# Altium schematic symbol library Module.SchLib: 74 symbols (part 2 of 2)
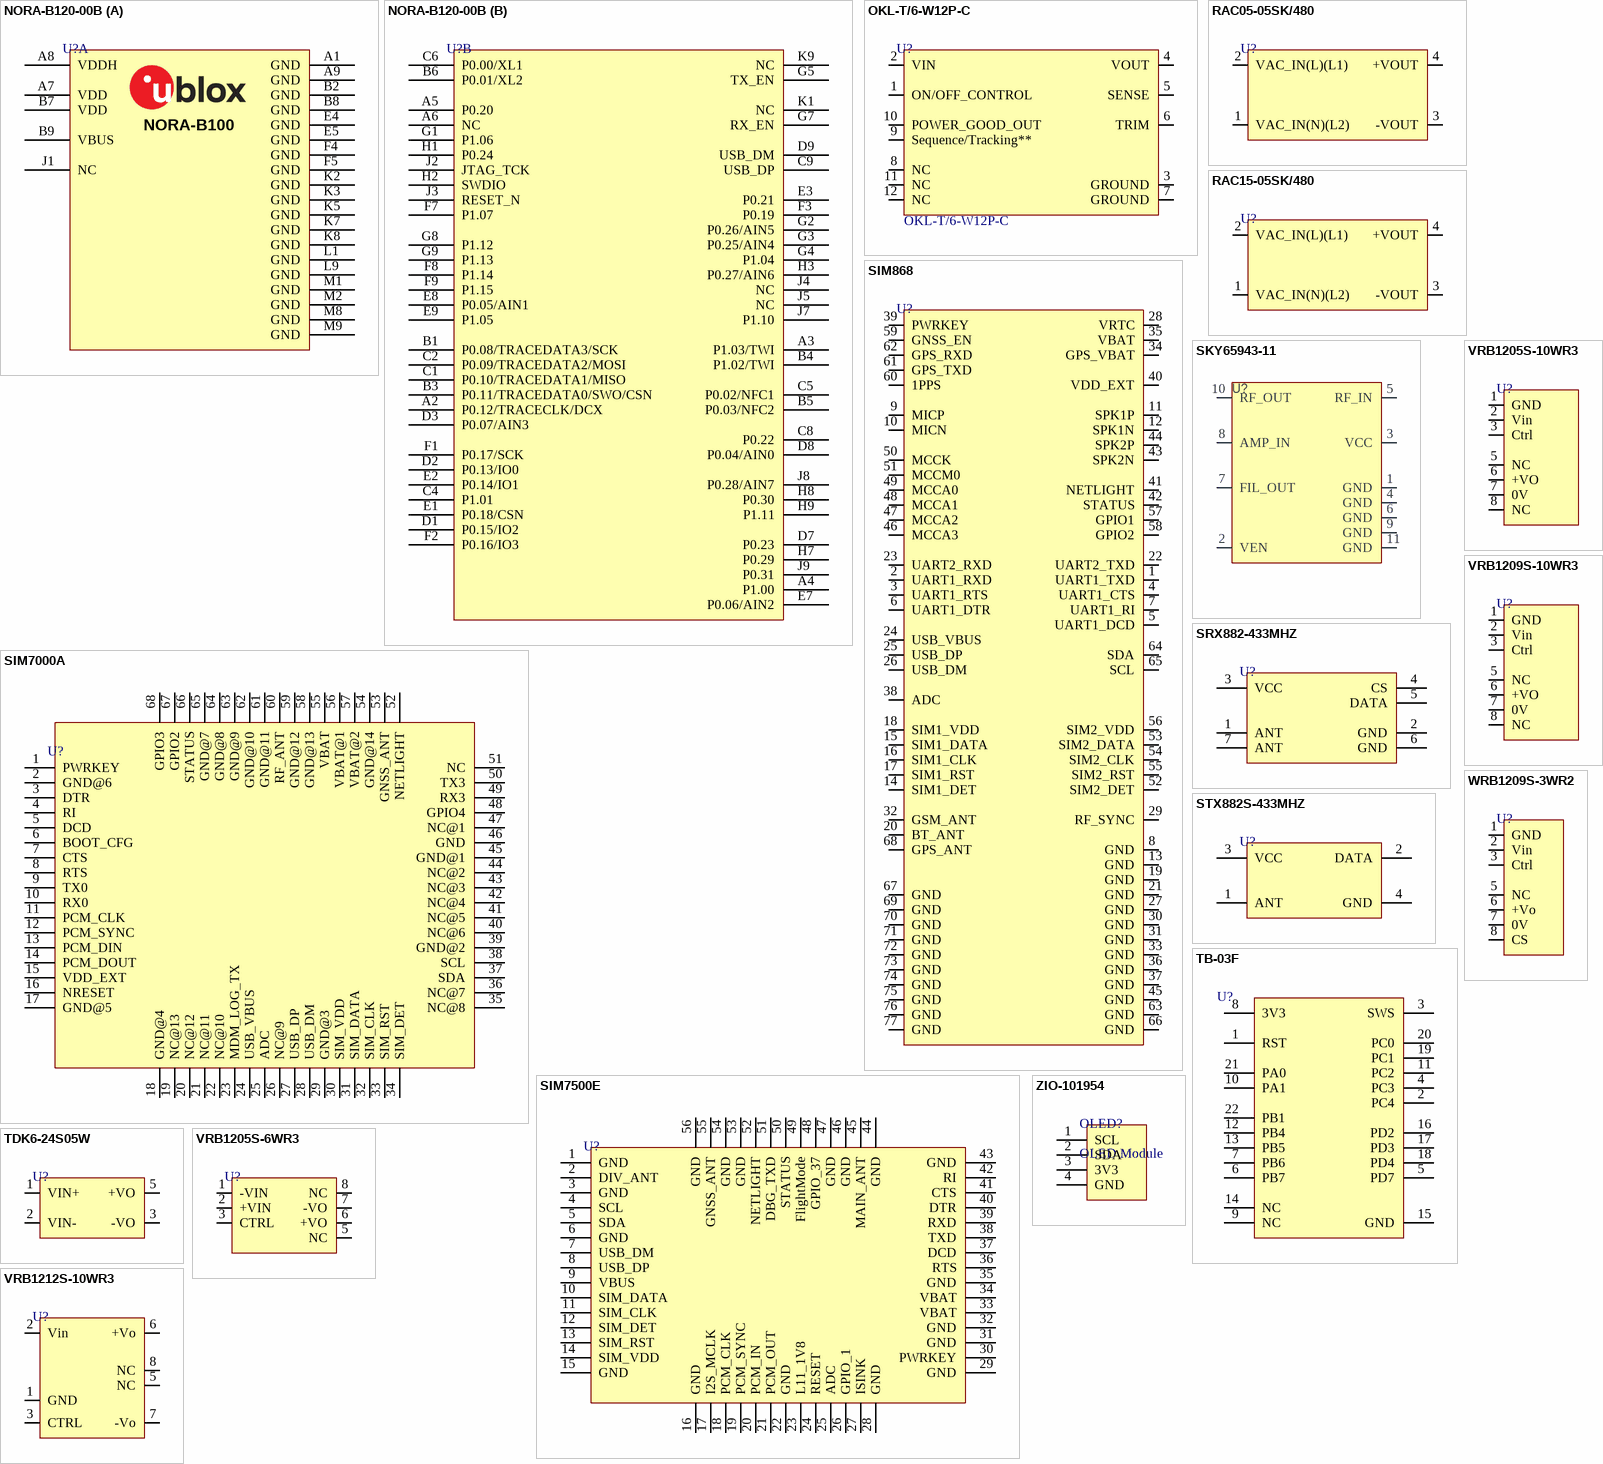
[diagram p5: symbols NORA-B120-00B to ZIO-101954]

## RAC05-05SK/480
designator U?
AC/DC CONVERTER 5V 5W; Manufacturer: Recom Power; Manufacturer Part Number: RAC05-05SK/480; Item Type: Voltage Regulators - Switching; Approvals: CE, EN, IEC, UL; Efficiency: 63%; Max Supply Voltage: 528V; Max Output current: 1A; Max Output Voltage: 5.05V; Min Input Voltage: 85V; Min Output Voltage: 4.95V; Nominal Supply Voltage: 480V; Number of Circuits: 1; Supplier: DigiKey; Supplier Part Number: 945-3185-ND; RoHS: Compliant; Stock: 856; Pricing: 1=18.3, 5=17.424, 10=17.063, 25=16.596, 50=16.251, 100=15.9134, 250=15.47772, 500=15.15614 (USD); Height: 23mm; Height - Seated (Max): 23.5mm; Length: 52.5mm; Lifecycle Status: Production; Max Operating Temperature: 60°C; Max Output Power: 5W; Min Operating Temperature: -40°C; Nominal Output Voltage: 5V; Number of Outputs: 1; Number of Terminals: 4; Output Current: 1A; Output Power: 5W; Output Voltage: 5V; REACH SVHC: Yes; Schedule B: 8504409580; Weight: 58g; Width: 27.4mm; ComponentLink1URL: https://datasheet.octopart.com:443/RAC05-05SK-480-Recom-Power-datasheet-181184451.pdf?src-supplier=IHS; ComponentLink1Description: https://datasheet.octopart.com:443/RAC05-05SK-480-Recom-Power-datasheet-181184451.pdf?src-supplier=IHS; ComponentLink2URL: https://datasheet.octopart.com:443/RAC05-05SK-480-Recom-Power-datasheet-133924410.pdf?src-supplier=Farnell; ComponentLink2Description: https://datasheet.octopart.com:443/RAC05-05SK-480-Recom-Power-datasheet-133924410.pdf?src-supplier=Farnell; ComponentLink3URL: https://datasheet.octopart.com:443/RAC05-05SK-480-Recom-Power-datasheet-148822129.pdf?src-supplier=Electro+Sonic; ComponentLink3Description: https://datasheet.octopart.com:443/RAC05-05SK-480-Recom-Power-datasheet-148822129.pdf?src-supplier=Electro+Sonic; ComponentLink4URL: https://datasheet.octopart.com:443/RAC05-05SK-480-Recom-Power-datasheet-138144762.pdf?src-supplier=RS+(Formerly+Allied+Electronics); ComponentLink4Description: https://datasheet.octopart.com:443/RAC05-05SK-480-Recom-Power-datasheet-138144762.pdf?src-supplier=RS+(Formerly+Allied+Electronics); ComponentLink5URL: https://datasheet.octopart.com:443/RAC05-05SK-480-Recom-Power-datasheet-165581948.pdf?src-supplier=TME; ComponentLink5Description: https://datasheet.octopart.com:443/RAC05-05SK-480-Recom-Power-datasheet-165581948.pdf?src-supplier=TME
footprint RAC05-05SK/480
pins: 1 VAC_IN(N)(L2), 2 VAC_IN(L)(L1), 3 -VOUT, 4 +VOUT

## RAC15-05SK/480
designator U?
AC/DC CONVERTER 5V 15W; Manufacturer: Recom Power; Manufacturer Part Number: RAC15-05SK/480; Item Type: Power Supply Modules; Supplier: DigiKey; Supplier Part Number: 945-RAC15-05SK/480-ND; RoHS: Compliant; Stock: 99; Pricing: 1=24.29, 5=23.134, 10=22.653, 25=22.0328, 50=21.575, 100=21.1268, 250=20.54848, 500=17.6 (USD); Lifecycle Status: Production; REACH SVHC: Yes; ComponentLink1URL: https://datasheet.octopart.com:443/RAC15-05SK-480-Recom-Power-datasheet-181184459.pdf?src-supplier=IHS; ComponentLink1Description: https://datasheet.octopart.com:443/RAC15-05SK-480-Recom-Power-datasheet-181184459.pdf?src-supplier=IHS; ComponentLink2URL: https://datasheet.octopart.com:443/RAC15-05SK-480-Recom-Power-datasheet-165035638.pdf?src-supplier=TME; ComponentLink2Description: https://datasheet.octopart.com:443/RAC15-05SK-480-Recom-Power-datasheet-165035638.pdf?src-supplier=TME; ComponentLink3URL: https://datasheet.octopart.com:443/RAC15-05SK-480-Recom-Power-datasheet-166935981.pdf?src-supplier=TME; ComponentLink3Description: https://datasheet.octopart.com:443/RAC15-05SK-480-Recom-Power-datasheet-166935981.pdf?src-supplier=TME
footprint RAC15-05SK/480
pins: 1 VAC_IN(N)(L2), 2 VAC_IN(L)(L1), 3 -VOUT, 4 +VOUT

## SIM868
designator U?
SMD,15.7x17.6mm 2G/3G/4G/5G Modules ROHS; Manufacturer: Simcom; Manufacturer Part Number: SIM868; Item Type: Module; Supplier: Avnet; LCSC Part Number: C89549; RoHS: No
footprint SIM868
pins: 1 UART1_TXD, 2 UART1_RXD, 3 UART1_RTS, 4 UART1_CTS, 5 UART1_DCD, 6 UART1_DTR, 7 UART1_RI, 8 GND, 9 MICP, 10 MICN, 11 SPK1P, 12 SPK1N, 13 GND, 14 SIM1_DET, 15 SIM1_DATA, 16 SIM1_CLK, 17 SIM1_RST, 18 SIM1_VDD, 19 GND, 20 BT_ANT, 21 GND, 22 UART2_TXD, 23 UART2_RXD, 24 USB_VBUS, 25 USB_DP, 26 USB_DM, 27 GND, 28 VRTC, 29 RF_SYNC, 30 GND, 31 GND, 32 GSM_ANT, 33 GND, 34 GPS_VBAT, 35 VBAT, 36 GND, 37 GND, 38 ADC, 39 PWRKEY, 40 VDD_EXT, 41 NETLIGHT, 42 STATUS, 43 SPK2N, 44 SPK2P, 45 GND, 46 MCCA3, 47 MCCA2, 48 MCCA1, 49 MCCA0, 50 MCCK, 51 MCCM0, 52 SIM2_DET, 53 SIM2_DATA, 54 SIM2_CLK, 55 SIM2_RST, 56 SIM2_VDD, 57 GPIO1, 58 GPIO2, 59 GNSS_EN, 60 1PPS, 61 GPS_TXD, 62 GPS_RXD, 63 GND, 64 SDA, 65 SCL, 66 GND, 67 GND, 68 GPS_ANT, 69 GND, 70 GND, 71 GND, 72 GND, 73 GND, 74 GND, 75 GND, 76 GND, 77 GND

## SIM7000A
designator U?
eMTC CAT-M1 Module 700MHz/1700MHz/1900MHz 3.8V LCC; Manufacturer: Simcom; Manufacturer Part Number: SIM7000A; Supplier 1: Avnet; RoHS: No; Category: Uncategorized; Pricing 1: 50=18.60000, 100=17.40000, 200=16.20000, 300=15.60000, 400=15.00000, 500=15.00000, 5000=14.64000 (USD); Supplier Part Number 1: SIM7000A; ComponentLink1Description: LCSC; ComponentLink1URL: https://www.lcsc.com/product-detail/2G-3G-4G-5G-Modules_SIMCom-Wireless-Solutions-SIM7000A_C126271.html; LCSC Part Number: C126271; Item Type: Module
footprint SIM7000A
pins: 1 PWRKEY, 2 GND@6, 3 DTR, 4 RI, 5 DCD, 6 BOOT_CFG, 7 CTS, 8 RTS, 9 TX0, 10 RX0, 11 PCM_CLK, 12 PCM_SYNC, 13 PCM_DIN, 14 PCM_DOUT, 15 VDD_EXT, 16 NRESET, 17 GND@5, 18 GND@4, 19 NC@13, 20 NC@12, 21 NC@11, 22 NC@10, 23 MDM_LOG_TX, 24 USB_VBUS, 25 ADC, 26 NC@9, 27 USB_DP, 28 USB_DM, 29 GND@3, 30 SIM_VDD, 31 SIM_DATA, 32 SIM_CLK, 33 SIM_RST, 34 SIM_DET, 35 NC@8, 36 NC@7, 37 SDA, 38 SCL, 39 GND@2, 40 NC@6, 41 NC@5, 42 NC@4, 43 NC@3, 44 NC@2, 45 GND@1, 46 GND, 47 NC@1, 48 GPIO4, 49 RX3, 50 TX3, 51 NC, 52 NETLIGHT, 53 GNSS_ANT, 54 GND@14, 55 VBAT, 56 VBAT@1, 57 VBAT@2, 58 GND@13, 59 GND@12, 60 RF_ANT, 61 GND@11, 62 GND@10, 63 GND@9, 64 GND@8, 65 GND@7, 66 STATUS, 67 GPIO2, 68 GPIO3

## SIM7500E
designator U?
SMD,30x30mm 2G/3G/4G/5G Modules ROHS; Manufacturer: SIMCom; Manufacturer Part Number: SIM7500E; Item Type: IC; Package: SMD,30x30mm; LCSC Part Number: C126259; ComponentLink1Description: LCSC; ComponentLink1URL: https://www.lcsc.com/product-detail/2G-3G-4G-5G-Modules_SIMCom-Wireless-Solutions-SIM7500E_C126259.html
footprint SIM7500E
pins: 1 GND, 2 DIV_ANT, 3 GND, 4 SCL, 5 SDA, 6 GND, 7 USB_DM, 8 USB_DP, 9 VBUS, 10 SIM_DATA, 11 SIM_CLK, 12 SIM_DET, 13 SIM_RST, 14 SIM_VDD, 15 GND, 16 GND, 17 I2S_MCLK, 18 PCM_CLK, 19 PCM_SYNC, 20 PCM_IN, 21 PCM_OUT, 22 GND, 23 L11_1V8, 24 RESET, 25 ADC, 26 GPIO_1, 27 ISINK, 28 GND, 29 GND, 30 PWRKEY, 31 GND, 32 GND, 33 VBAT, 34 VBAT, 35 GND, 36 RTS, 37 DCD, 38 TXD, 39 RXD, 40 DTR, 41 CTS, 42 RI, 43 GND, 44 GND, 45 MAIN_ANT, 46 GND, 47 GND, 48 GPIO_37, 49 FlightMode, 50 STATUS, 51 DBG_TXD, 52 NETLIGHT, 53 GND, 54 GND, 55 GNSS_ANT, 56 GND

## SKY65943-11
designator U?
GNSS Low-Noise Amplifier Front-End Module with Integrated Pre-Filter and Post-Filter; Manufacturer: Skyworks; Manufacturer Part Number: SKY65943-11; Value: SKY65943-11; Note: N.A.; Item Type: Module; Footprint Doc: MCM-10; ComponentLink1URL: http://www.skyworksinc.com/uploads/documents/SKY65943_11_204404F.pdf; ComponentLink1Description: Datasheet; ComponentLink2URL: https://www.digikey.com/product-detail/en/skyworks-solutions-inc/SKY65943-11/863-2032-1-ND; ComponentLink2Description: Supplier link; HelpURL: http://www.skyworksinc.com/Product/3579/SKY65943-11; LatestRevisionDate: 2019-04-16; Published: 2019-04-16; Supplier 1: Digi-Key; Supplier Part Number 1: 863-2032-1-ND; Supplier 2: Mouser; Supplier Part Number 2: 873-SKY65943-11; Author: rsk
footprint 10-MCM (2.5x2.5)
pins: 1 GND, 2 VEN, 3 VCC, 4 GND, 5 RF_IN, 6 GND, 7 FIL_OUT, 8 AMP_IN, 9 GND, 10 RF_OUT, 11 GND

## SRX882-433MHZ
designator U?
RF Modules ROHS; Manufacturer: G-NiceRF; Manufacturer Part Number: SRX882-433MHZ; LCSC Part Number: C5126754; ComponentLink1Description: LCSC; ComponentLink1URL: https://www.lcsc.com/product-detail/RF-Modules_G-NiceRF-STX882S-433MHZ-SRX882-433MHZ-SW433-TH32_C5126754.html
footprint SRX882-433MHZ
pins: 1 ANT, 2 GND, 3 VCC, 4 CS, 5 DATA, 6 GND, 7 ANT

## STX882S-433MHZ
designator U?
RF Modules ROHS; Manufacturer: G-NiceRF; Manufacturer Part Number: STX882S-433MHZ; LCSC Part Number: C5126754; ComponentLink1Description: LCSC; ComponentLink1URL: https://www.lcsc.com/product-detail/RF-Modules_G-NiceRF-STX882S-433MHZ-SRX882-433MHZ-SW433-TH32_C5126754.html
footprint STX882S-433MHZ
pins: 1 ANT, 2 DATA, 3 VCC, 4 GND

## TB-03F
designator U?
Bluetooth Modules RoHS; Manufacturer: Ai-Thinker; Brand Category: Authorized Brands; Category: IoT/Communication Modules/Bluetooth Modules; LCSC Part Number: C2764069; ComponentLink1Description: LCSC; ComponentLink1URL: https://www.lcsc.com/product-detail/Bluetooth-Modules_Ai-Thinker-TB-03F_C2764069.html
footprint TB-03F_ (Bluetooth Modules RoHS)
pins: 1 RST, 2 PC4, 3 SWS, 4 PC3, 5 PD7, 6 PB7, 7 PB6, 8 3V3, 9 NC, 10 PA1, 11 PC2, 12 PB4, 13 PB5, 14 NC, 15 GND, 16 PD2, 17 PD3, 18 PD4, 19 PC1, 20 PC0, 21 PA0, 22 PB1

## TDK6-24S05W
designator U?
Plugin,25.4x25.4mm Isolated Power Modules ROHS; Manufacturer: TDPOWER; Manufacturer Part Number: TDK6-24S05W; Item Type: Power Module.; Package: Plugin,25.4x25.4mm; LCSC Part Number: C3033110; ComponentLink1Description: LCSC; ComponentLink1URL: https://www.lcsc.com/product-detail/Isolated-Power-Modules_TDPOWER-TDK6-24S05W_C3033110.html
footprint TDK6-24S05W
pins: 1 VIN+, 2 VIN-, 3 -VO, 5 +VO

## VRB1205S-6WR3
designator U?
SIP Isolated Power Modules ROHS; Manufacturer: YLPTEC; Manufacturer Part Number: VRB1205S-6WR3; Package: SIP; LCSC Part Number: C5369846; Item Type: Power Module; ComponentLink1Description: LCSC; ComponentLink1URL: https://www.lcsc.com/product-detail/Isolated-Power-Modules_YLPTEC-VRB1205S-6WR3_C5369846.html
footprint VRB1205S-6WR3
pins: 1 -VIN, 2 +VIN, 3 CTRL, 5 NC, 6 +VO, 7 -VO, 8 NC

## VRB1205S-10WR3
designator U?
SIP Isolated Power Modules ROHS; Manufacturer: YLPTEC; Manufacturer Part Number: VRB1205S-10WR3; Package: SIP; LCSC Part Number: C5369851; Item Type: Power Module; ComponentLink1Description: LCSC; ComponentLink1URL: https://jlcpcb.com/partdetail/Ylptec-VRB1205S10WR3/C5369851
footprint VRB1205S-10WR3
pins: 1 GND, 2 Vin, 3 Ctrl, 5 NC, 6 +VO, 7 0V, 8 NC

## VRB1209S-10WR3
designator U?
10W wide-voltage input, isolated and regulated single-channel/positive-negative dual-channel output DC/DC power supply module; Manufacturer: YLPTEC; Manufacturer Part Number: VRB1209S-10WR3; Package: DIP; LCSC Part Number: C7468824; Item Type: Module; ComponentLink1Description: LCSC; ComponentLink1URL: https://www.lcsc.com/product-detail/C7468824.html
footprint VRB1209S-10WR3
pins: 1 GND, 2 Vin, 3 Ctrl, 5 NC, 6 +VO, 7 0V, 8 NC

## VRB1212S-10WR3
designator U?
10W wide-voltage input, isolated and regulated single-channel/positive-negative dual-channel output DC/DC power supply module; Manufacturer: YLPTEC; Manufacturer Part Number: VRB1212S-10WR3; Package: DIP; LCSC Part Number: C7468825; Item Type: Module; ComponentLink1Description: LCSC; ComponentLink1URL: https://www.lcsc.com/product-detail/C7468825.html?s_z=n_VRB1212S-10WR3
footprint VRB1212S-10WR3
pins: 1 GND, 2 Vin, 3 CTRL, 5 NC, 6 +Vo, 7 -Vo, 8 NC

## WRB1209S-3WR2
designator U?
3W Isolated Regulated Dual/ Single Output DC/DC Module Power Supply with Ultra-wide Voltage Input; Manufacturer: YLPTEC; Manufacturer Part Number: WRB1209S-3WR2; Package: SIP,22x9.5mm; LCSC Part Number: C5369672; Item Type: Module; ComponentLink1Description: LCSC; ComponentLink1URL: https://www.lcsc.com/product-detail/C5369672.html
footprint WRB1209S-3WR2
pins: 1 GND, 2 Vin, 3 Ctrl, 5 NC, 6 +Vo, 7 0V, 8 CS

## ZIO-101954
designator OLED?, comment OLED Module
ZIO QWIIC 1.5INCH OLED DISPLAY; Manufacturer: Smart Prototyping; Manufacturer Part Number: ZIO-101954; Package: Custom; LCSC Part Number: *; Item Type: OLED Module; ComponentLink1Description: Digikey; ComponentLink1URL: https://www.digikey.com/en/products/detail/smart-prototyping/ZIO-101954/14565832
footprint ZIO-101954 (ZIO QWIIC 1.5INCH OLED DISPLAY)
pins: 1 SCL, 2 SDA, 3 3V3, 4 GND